# Altium footprint library Screw.PcbLib: 17 footprints (part 1 of 2)
Each footprint in its own frame and in the unit in brackets; x right, y up, seen from the top. Pads: shape width x height; smd on the part's side, far side on the other; paste and mask are expansions set on the pad; w line width, h text height; cw(c..) or ccw(c..) is an arc to the next point about the centre after c.
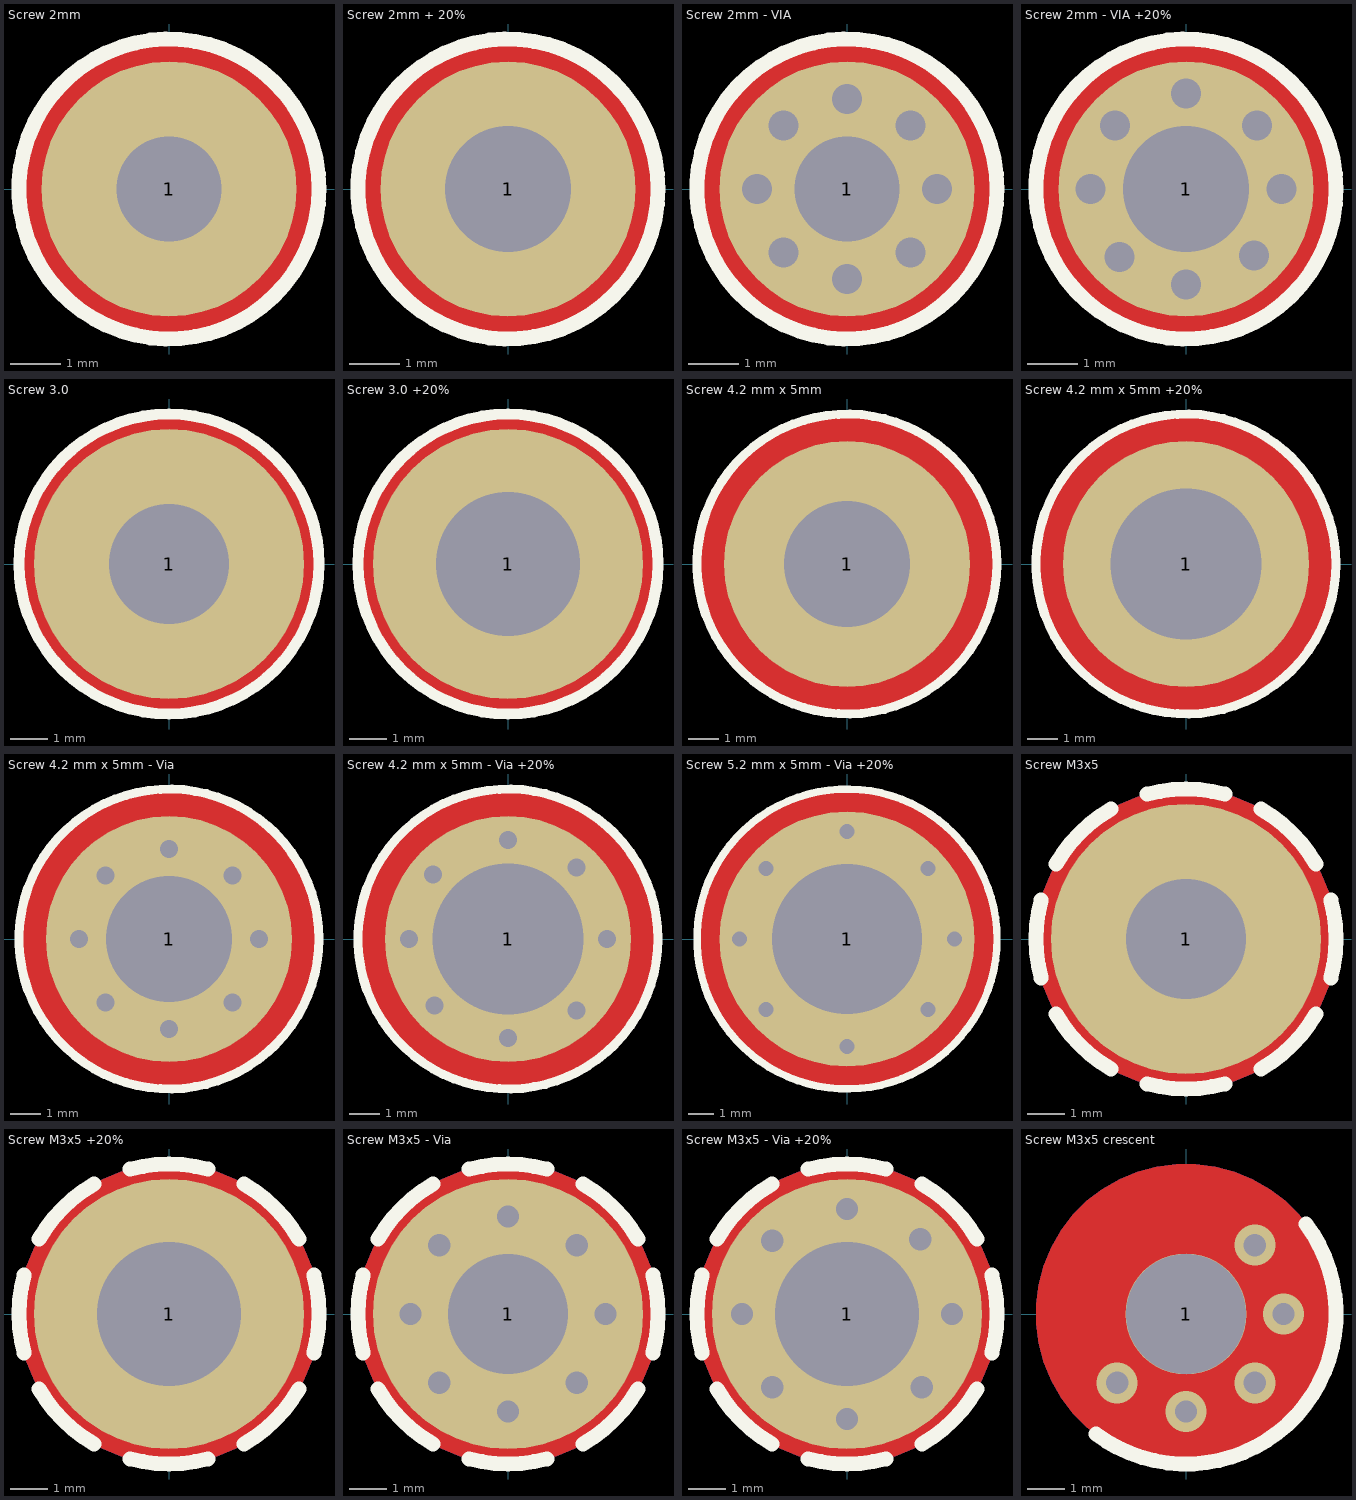
[diagram p0: the footprints below, top view; thin cyan lines are the x and y axes]

## Screw 2mm [mm] "Hole 2.1mm"
height 10
pads (1):
  round 5.1 hole 2.1 mask+0.1: 1(0,0)
Top Layer:
  pour cut-out: 0,-3 -0.197,-3 -0.587,-2.949 -0.966,-2.847 -1.33,-2.696 -1.67,-2.5 -1.982,-2.26 -2.26,-1.982 -2.5,-1.67 -2.696,-1.33 -2.847,-0.966 -2.949,-0.587 -3,-0.197 -3,0 -3,0.197 -2.949,0.587 -2.847,0.966 -2.696,1.33 -2.5,1.67 -2.26,1.982 -1.982,2.26 -1.67,2.5 -1.33,2.696 -0.966,2.847 -0.587,2.949 -0.197,3 0,3 0.197,3 0.587,2.949 0.966,2.847 1.33,2.696 1.67,2.5 1.982,2.26 2.26,1.982 2.5,1.67 2.696,1.33 2.847,0.966 2.949,0.587 3,0.197 3,0 3,-0.197 2.949,-0.587 2.847,-0.966 2.696,-1.33 2.5,-1.67 2.26,-1.982 1.982,-2.26 1.67,-2.5 1.33,-2.696 0.966,-2.847 0.587,-2.949 0.197,-3
Bottom Layer:
  pour cut-out: 0,-3 -0.197,-3 -0.587,-2.949 -0.966,-2.847 -1.33,-2.696 -1.67,-2.5 -1.982,-2.26 -2.26,-1.982 -2.5,-1.67 -2.696,-1.33 -2.847,-0.966 -2.949,-0.587 -3,-0.197 -3,0 -3,0.197 -2.949,0.587 -2.847,0.966 -2.696,1.33 -2.5,1.67 -2.26,1.982 -1.982,2.26 -1.67,2.5 -1.33,2.696 -0.966,2.847 -0.587,2.949 -0.197,3 0,3 0.197,3 0.587,2.949 0.966,2.847 1.33,2.696 1.67,2.5 1.982,2.26 2.26,1.982 2.5,1.67 2.696,1.33 2.847,0.966 2.949,0.587 3,0.197 3,0 3,-0.197 2.949,-0.587 2.847,-0.966 2.696,-1.33 2.5,-1.67 2.26,-1.982 1.982,-2.26 1.67,-2.5 1.33,-2.696 0.966,-2.847 0.587,-2.949 0.197,-3
Top Overlay:
  circle w0.3: c0,0 r3
3D body "pn11340018.stp": height 1.73, standoff -3.8, extent -2,-2 2,2

## Screw 2mm + 20% [mm] "Hole 2.1mm"
height 10
pads (1):
  round 5.1 hole 2.52 mask+0.1: 1(0,0)
Top Layer:
  pour cut-out: 0,-3 -0.197,-3 -0.587,-2.949 -0.966,-2.847 -1.33,-2.696 -1.67,-2.5 -1.982,-2.26 -2.26,-1.982 -2.5,-1.67 -2.696,-1.33 -2.847,-0.966 -2.949,-0.587 -3,-0.197 -3,0 -3,0.197 -2.949,0.587 -2.847,0.966 -2.696,1.33 -2.5,1.67 -2.26,1.982 -1.982,2.26 -1.67,2.5 -1.33,2.696 -0.966,2.847 -0.587,2.949 -0.197,3 0,3 0.197,3 0.587,2.949 0.966,2.847 1.33,2.696 1.67,2.5 1.982,2.26 2.26,1.982 2.5,1.67 2.696,1.33 2.847,0.966 2.949,0.587 3,0.197 3,0 3,-0.197 2.949,-0.587 2.847,-0.966 2.696,-1.33 2.5,-1.67 2.26,-1.982 1.982,-2.26 1.67,-2.5 1.33,-2.696 0.966,-2.847 0.587,-2.949 0.197,-3
Bottom Layer:
  pour cut-out: 0,-3 -0.197,-3 -0.587,-2.949 -0.966,-2.847 -1.33,-2.696 -1.67,-2.5 -1.982,-2.26 -2.26,-1.982 -2.5,-1.67 -2.696,-1.33 -2.847,-0.966 -2.949,-0.587 -3,-0.197 -3,0 -3,0.197 -2.949,0.587 -2.847,0.966 -2.696,1.33 -2.5,1.67 -2.26,1.982 -1.982,2.26 -1.67,2.5 -1.33,2.696 -0.966,2.847 -0.587,2.949 -0.197,3 0,3 0.197,3 0.587,2.949 0.966,2.847 1.33,2.696 1.67,2.5 1.982,2.26 2.26,1.982 2.5,1.67 2.696,1.33 2.847,0.966 2.949,0.587 3,0.197 3,0 3,-0.197 2.949,-0.587 2.847,-0.966 2.696,-1.33 2.5,-1.67 2.26,-1.982 1.982,-2.26 1.67,-2.5 1.33,-2.696 0.966,-2.847 0.587,-2.949 0.197,-3
Top Overlay:
  circle w0.3: c0,0 r3
3D body "pn11340018.stp": height 1.73, standoff -3.8, extent -2,-2 2,2

## Screw 2mm - VIA [mm] "Hole 2.1mm"
height 10
pads (1):
  round 5.1 hole 2.1 mask+0.1: 1(0,0)
via 0,1.8 diameter 1.1 hole 0.6
via -1.273,1.273 diameter 1.1 hole 0.6
via -1.8,0 diameter 1.1 hole 0.6
via -1.273,-1.273 diameter 1.1 hole 0.6
via 0,-1.8 diameter 1.1 hole 0.6
via 1.273,-1.273 diameter 1.1 hole 0.6
via 1.8,0 diameter 1.1 hole 0.6
via 1.273,1.273 diameter 1.1 hole 0.6
Top Layer:
  pour cut-out: 0,-3 -0.197,-3 -0.587,-2.949 -0.966,-2.847 -1.33,-2.696 -1.67,-2.5 -1.982,-2.26 -2.26,-1.982 -2.5,-1.67 -2.696,-1.33 -2.847,-0.966 -2.949,-0.587 -3,-0.197 -3,0 -3,0.197 -2.949,0.587 -2.847,0.966 -2.696,1.33 -2.5,1.67 -2.26,1.982 -1.982,2.26 -1.67,2.5 -1.33,2.696 -0.966,2.847 -0.587,2.949 -0.197,3 0,3 0.197,3 0.587,2.949 0.966,2.847 1.33,2.696 1.67,2.5 1.982,2.26 2.26,1.982 2.5,1.67 2.696,1.33 2.847,0.966 2.949,0.587 3,0.197 3,0 3,-0.197 2.949,-0.587 2.847,-0.966 2.696,-1.33 2.5,-1.67 2.26,-1.982 1.982,-2.26 1.67,-2.5 1.33,-2.696 0.966,-2.847 0.587,-2.949 0.197,-3
Bottom Layer:
  pour cut-out: 0,-3 -0.197,-3 -0.587,-2.949 -0.966,-2.847 -1.33,-2.696 -1.67,-2.5 -1.982,-2.26 -2.26,-1.982 -2.5,-1.67 -2.696,-1.33 -2.847,-0.966 -2.949,-0.587 -3,-0.197 -3,0 -3,0.197 -2.949,0.587 -2.847,0.966 -2.696,1.33 -2.5,1.67 -2.26,1.982 -1.982,2.26 -1.67,2.5 -1.33,2.696 -0.966,2.847 -0.587,2.949 -0.197,3 0,3 0.197,3 0.587,2.949 0.966,2.847 1.33,2.696 1.67,2.5 1.982,2.26 2.26,1.982 2.5,1.67 2.696,1.33 2.847,0.966 2.949,0.587 3,0.197 3,0 3,-0.197 2.949,-0.587 2.847,-0.966 2.696,-1.33 2.5,-1.67 2.26,-1.982 1.982,-2.26 1.67,-2.5 1.33,-2.696 0.966,-2.847 0.587,-2.949 0.197,-3
Top Overlay:
  circle w0.3: c0,0 r3
3D body "pn11340018.stp": height 1.73, standoff -3.8, extent -2,-2 2,2

## Screw 2mm - VIA +20% [mm] "Hole 2.1mm"
height 10
pads (1):
  round 5.1 hole 2.52 mask+0.1: 1(0,0)
via -1.33,-1.364 diameter 1.1 hole 0.6
via -1.905,0 diameter 1.1 hole 0.6
via -1.417,1.273 diameter 1.1 hole 0.6
via 0,1.905 diameter 1.1 hole 0.6
via 1.417,1.273 diameter 1.1 hole 0.6
via 1.905,0 diameter 1.1 hole 0.6
via 1.364,-1.33 diameter 1.1 hole 0.6
via 0,-1.905 diameter 1.1 hole 0.6
Top Layer:
  pour cut-out: 0,-3 -0.197,-3 -0.587,-2.949 -0.966,-2.847 -1.33,-2.696 -1.67,-2.5 -1.982,-2.26 -2.26,-1.982 -2.5,-1.67 -2.696,-1.33 -2.847,-0.966 -2.949,-0.587 -3,-0.197 -3,0 -3,0.197 -2.949,0.587 -2.847,0.966 -2.696,1.33 -2.5,1.67 -2.26,1.982 -1.982,2.26 -1.67,2.5 -1.33,2.696 -0.966,2.847 -0.587,2.949 -0.197,3 0,3 0.197,3 0.587,2.949 0.966,2.847 1.33,2.696 1.67,2.5 1.982,2.26 2.26,1.982 2.5,1.67 2.696,1.33 2.847,0.966 2.949,0.587 3,0.197 3,0 3,-0.197 2.949,-0.587 2.847,-0.966 2.696,-1.33 2.5,-1.67 2.26,-1.982 1.982,-2.26 1.67,-2.5 1.33,-2.696 0.966,-2.847 0.587,-2.949 0.197,-3
Bottom Layer:
  pour cut-out: 0,-3 -0.197,-3 -0.587,-2.949 -0.966,-2.847 -1.33,-2.696 -1.67,-2.5 -1.982,-2.26 -2.26,-1.982 -2.5,-1.67 -2.696,-1.33 -2.847,-0.966 -2.949,-0.587 -3,-0.197 -3,0 -3,0.197 -2.949,0.587 -2.847,0.966 -2.696,1.33 -2.5,1.67 -2.26,1.982 -1.982,2.26 -1.67,2.5 -1.33,2.696 -0.966,2.847 -0.587,2.949 -0.197,3 0,3 0.197,3 0.587,2.949 0.966,2.847 1.33,2.696 1.67,2.5 1.982,2.26 2.26,1.982 2.5,1.67 2.696,1.33 2.847,0.966 2.949,0.587 3,0.197 3,0 3,-0.197 2.949,-0.587 2.847,-0.966 2.696,-1.33 2.5,-1.67 2.26,-1.982 1.982,-2.26 1.67,-2.5 1.33,-2.696 0.966,-2.847 0.587,-2.949 0.197,-3
Top Overlay:
  circle w0.3: c0,0 r3
3D body "pn11340018.stp": height 1.73, standoff -3.8, extent -2,-2 2,2

## Screw 3.0 [mm] "Hole 3.0mm"
height 10
pads (1):
  round 7.2 hole 3.2 mask+0.1: 1(0,0)
Top Layer:
  pour cut-out: 0,-4 -0.262,-4 -0.782,-3.932 -1.289,-3.796 -1.773,-3.595 -2.227,-3.333 -2.643,-3.014 -3.014,-2.643 -3.333,-2.227 -3.595,-1.773 -3.796,-1.289 -3.932,-0.782 -4,-0.262 -4,0 -4,0.262 -3.932,0.782 -3.796,1.289 -3.595,1.773 -3.333,2.227 -3.014,2.643 -2.643,3.014 -2.227,3.333 -1.773,3.595 -1.289,3.796 -0.782,3.932 -0.262,4 0,4 0.262,4 0.782,3.932 1.289,3.796 1.773,3.595 2.227,3.333 2.643,3.014 3.014,2.643 3.333,2.227 3.595,1.773 3.796,1.289 3.932,0.782 4,0.262 4,0 4,-0.262 3.932,-0.782 3.796,-1.289 3.595,-1.773 3.333,-2.227 3.014,-2.643 2.643,-3.014 2.227,-3.333 1.773,-3.595 1.289,-3.796 0.782,-3.932 0.262,-4
Bottom Layer:
  pour cut-out: 0,-4 -0.262,-4 -0.782,-3.932 -1.289,-3.796 -1.773,-3.595 -2.227,-3.333 -2.643,-3.014 -3.014,-2.643 -3.333,-2.227 -3.595,-1.773 -3.796,-1.289 -3.932,-0.782 -4,-0.262 -4,0 -4,0.262 -3.932,0.782 -3.796,1.289 -3.595,1.773 -3.333,2.227 -3.014,2.643 -2.643,3.014 -2.227,3.333 -1.773,3.595 -1.289,3.796 -0.782,3.932 -0.262,4 0,4 0.262,4 0.782,3.932 1.289,3.796 1.773,3.595 2.227,3.333 2.643,3.014 3.014,2.643 3.333,2.227 3.595,1.773 3.796,1.289 3.932,0.782 4,0.262 4,0 4,-0.262 3.932,-0.782 3.796,-1.289 3.595,-1.773 3.333,-2.227 3.014,-2.643 2.643,-3.014 2.227,-3.333 1.773,-3.595 1.289,-3.796 0.782,-3.932 0.262,-4
Top Overlay:
  circle w0.3: c0,0 r4
3D body "Screw-3mmX10mm.step": height 1.73, standoff -10, extent -2.5,-2.5 2.5,2.5

## Screw 3.0 +20% [mm] "Hole 3.0mm"
height 10
pads (1):
  round 7.2 hole 3.84 mask+0.1: 1(0,0)
Top Layer:
  pour cut-out: 0,-4 -0.262,-4 -0.782,-3.932 -1.289,-3.796 -1.773,-3.595 -2.227,-3.333 -2.643,-3.014 -3.014,-2.643 -3.333,-2.227 -3.595,-1.773 -3.796,-1.289 -3.932,-0.782 -4,-0.262 -4,0 -4,0.262 -3.932,0.782 -3.796,1.289 -3.595,1.773 -3.333,2.227 -3.014,2.643 -2.643,3.014 -2.227,3.333 -1.773,3.595 -1.289,3.796 -0.782,3.932 -0.262,4 0,4 0.262,4 0.782,3.932 1.289,3.796 1.773,3.595 2.227,3.333 2.643,3.014 3.014,2.643 3.333,2.227 3.595,1.773 3.796,1.289 3.932,0.782 4,0.262 4,0 4,-0.262 3.932,-0.782 3.796,-1.289 3.595,-1.773 3.333,-2.227 3.014,-2.643 2.643,-3.014 2.227,-3.333 1.773,-3.595 1.289,-3.796 0.782,-3.932 0.262,-4
Bottom Layer:
  pour cut-out: 0,-4 -0.262,-4 -0.782,-3.932 -1.289,-3.796 -1.773,-3.595 -2.227,-3.333 -2.643,-3.014 -3.014,-2.643 -3.333,-2.227 -3.595,-1.773 -3.796,-1.289 -3.932,-0.782 -4,-0.262 -4,0 -4,0.262 -3.932,0.782 -3.796,1.289 -3.595,1.773 -3.333,2.227 -3.014,2.643 -2.643,3.014 -2.227,3.333 -1.773,3.595 -1.289,3.796 -0.782,3.932 -0.262,4 0,4 0.262,4 0.782,3.932 1.289,3.796 1.773,3.595 2.227,3.333 2.643,3.014 3.014,2.643 3.333,2.227 3.595,1.773 3.796,1.289 3.932,0.782 4,0.262 4,0 4,-0.262 3.932,-0.782 3.796,-1.289 3.595,-1.773 3.333,-2.227 3.014,-2.643 2.643,-3.014 2.227,-3.333 1.773,-3.595 1.289,-3.796 0.782,-3.932 0.262,-4
Top Overlay:
  circle w0.3: c0,0 r4
3D body "Screw-3mmX10mm.step": height 1.73, standoff -10, extent -2.5,-2.5 2.5,2.5

## Screw 4.2 mm x 5mm [mm] "Hole 4.2 mm"
height 10
pads (1):
  round 8.2 hole 4.2 mask+0.1: 1(0,0)
Top Layer:
  pour cut-out: 0,-5 -0.328,-5 -0.978,-4.914 -1.611,-4.745 -2.216,-4.494 -2.784,-4.166 -3.304,-3.767 -3.767,-3.304 -4.166,-2.784 -4.494,-2.216 -4.745,-1.611 -4.914,-0.978 -5,-0.328 -5,0 -5,0.328 -4.914,0.978 -4.745,1.611 -4.494,2.216 -4.166,2.784 -3.767,3.304 -3.304,3.767 -2.784,4.166 -2.216,4.494 -1.611,4.745 -0.978,4.914 -0.328,5 0,5 0.328,5 0.978,4.914 1.611,4.745 2.216,4.494 2.784,4.166 3.304,3.767 3.767,3.304 4.166,2.784 4.494,2.216 4.745,1.611 4.914,0.978 5,0.328 5,0 5,-0.328 4.914,-0.978 4.745,-1.611 4.494,-2.216 4.166,-2.784 3.767,-3.304 3.304,-3.767 2.784,-4.166 2.216,-4.494 1.611,-4.745 0.978,-4.914 0.328,-5
Bottom Layer:
  pour cut-out: 0,-5 -0.328,-5 -0.978,-4.914 -1.611,-4.745 -2.216,-4.494 -2.784,-4.166 -3.304,-3.767 -3.767,-3.304 -4.166,-2.784 -4.494,-2.216 -4.745,-1.611 -4.914,-0.978 -5,-0.328 -5,0 -5,0.328 -4.914,0.978 -4.745,1.611 -4.494,2.216 -4.166,2.784 -3.767,3.304 -3.304,3.767 -2.784,4.166 -2.216,4.494 -1.611,4.745 -0.978,4.914 -0.328,5 0,5 0.328,5 0.978,4.914 1.611,4.745 2.216,4.494 2.784,4.166 3.304,3.767 3.767,3.304 4.166,2.784 4.494,2.216 4.745,1.611 4.914,0.978 5,0.328 5,0 5,-0.328 4.914,-0.978 4.745,-1.611 4.494,-2.216 4.166,-2.784 3.767,-3.304 3.304,-3.767 2.784,-4.166 2.216,-4.494 1.611,-4.745 0.978,-4.914 0.328,-5
Top Overlay:
  circle w0.3: c0,0 r5
3D body "t1crfchms_unf_no__8_36_0_188_0_188.stp": height 2.2, standoff -2.58, extent -3.619,-3.619 3.62,3.62

## Screw 4.2 mm x 5mm +20% [mm] "Hole 4.2 mm"
height 10
pads (1):
  round 8.2 hole 5.04 mask+0.1: 1(0,0)
Top Layer:
  pour cut-out: 0,-5 -0.328,-5 -0.978,-4.914 -1.611,-4.745 -2.216,-4.494 -2.784,-4.166 -3.304,-3.767 -3.767,-3.304 -4.166,-2.784 -4.494,-2.216 -4.745,-1.611 -4.914,-0.978 -5,-0.328 -5,0 -5,0.328 -4.914,0.978 -4.745,1.611 -4.494,2.216 -4.166,2.784 -3.767,3.304 -3.304,3.767 -2.784,4.166 -2.216,4.494 -1.611,4.745 -0.978,4.914 -0.328,5 0,5 0.328,5 0.978,4.914 1.611,4.745 2.216,4.494 2.784,4.166 3.304,3.767 3.767,3.304 4.166,2.784 4.494,2.216 4.745,1.611 4.914,0.978 5,0.328 5,0 5,-0.328 4.914,-0.978 4.745,-1.611 4.494,-2.216 4.166,-2.784 3.767,-3.304 3.304,-3.767 2.784,-4.166 2.216,-4.494 1.611,-4.745 0.978,-4.914 0.328,-5
Bottom Layer:
  pour cut-out: 0,-5 -0.328,-5 -0.978,-4.914 -1.611,-4.745 -2.216,-4.494 -2.784,-4.166 -3.304,-3.767 -3.767,-3.304 -4.166,-2.784 -4.494,-2.216 -4.745,-1.611 -4.914,-0.978 -5,-0.328 -5,0 -5,0.328 -4.914,0.978 -4.745,1.611 -4.494,2.216 -4.166,2.784 -3.767,3.304 -3.304,3.767 -2.784,4.166 -2.216,4.494 -1.611,4.745 -0.978,4.914 -0.328,5 0,5 0.328,5 0.978,4.914 1.611,4.745 2.216,4.494 2.784,4.166 3.304,3.767 3.767,3.304 4.166,2.784 4.494,2.216 4.745,1.611 4.914,0.978 5,0.328 5,0 5,-0.328 4.914,-0.978 4.745,-1.611 4.494,-2.216 4.166,-2.784 3.767,-3.304 3.304,-3.767 2.784,-4.166 2.216,-4.494 1.611,-4.745 0.978,-4.914 0.328,-5
Top Overlay:
  circle w0.3: c0,0 r5
3D body "t1crfchms_unf_no__8_36_0_188_0_188.stp": height 2.2, standoff -2.58, extent -3.619,-3.619 3.62,3.62

## Screw 4.2 mm x 5mm - Via [mm] "Hole 4.2 mm"
height 10
pads (1):
  round 8.2 hole 4.2 mask+0.1: 1(0,0)
via 0,3 diameter 1.1 hole 0.6
via -2.121,2.121 diameter 1.1 hole 0.6
via -3,0 diameter 1.1 hole 0.6
via -2.121,-2.121 diameter 1.1 hole 0.6
via 0,-3 diameter 1.1 hole 0.6
via 2.121,-2.121 diameter 1.1 hole 0.6
via 3,0 diameter 1.1 hole 0.6
via 2.121,2.121 diameter 1.1 hole 0.6
Top Layer:
  pour cut-out: 0,-5 -0.328,-5 -0.978,-4.914 -1.611,-4.745 -2.216,-4.494 -2.784,-4.166 -3.304,-3.767 -3.767,-3.304 -4.166,-2.784 -4.494,-2.216 -4.745,-1.611 -4.914,-0.978 -5,-0.328 -5,0 -5,0.328 -4.914,0.978 -4.745,1.611 -4.494,2.216 -4.166,2.784 -3.767,3.304 -3.304,3.767 -2.784,4.166 -2.216,4.494 -1.611,4.745 -0.978,4.914 -0.328,5 0,5 0.328,5 0.978,4.914 1.611,4.745 2.216,4.494 2.784,4.166 3.304,3.767 3.767,3.304 4.166,2.784 4.494,2.216 4.745,1.611 4.914,0.978 5,0.328 5,0 5,-0.328 4.914,-0.978 4.745,-1.611 4.494,-2.216 4.166,-2.784 3.767,-3.304 3.304,-3.767 2.784,-4.166 2.216,-4.494 1.611,-4.745 0.978,-4.914 0.328,-5
Bottom Layer:
  pour cut-out: 0,-5 -0.328,-5 -0.978,-4.914 -1.611,-4.745 -2.216,-4.494 -2.784,-4.166 -3.304,-3.767 -3.767,-3.304 -4.166,-2.784 -4.494,-2.216 -4.745,-1.611 -4.914,-0.978 -5,-0.328 -5,0 -5,0.328 -4.914,0.978 -4.745,1.611 -4.494,2.216 -4.166,2.784 -3.767,3.304 -3.304,3.767 -2.784,4.166 -2.216,4.494 -1.611,4.745 -0.978,4.914 -0.328,5 0,5 0.328,5 0.978,4.914 1.611,4.745 2.216,4.494 2.784,4.166 3.304,3.767 3.767,3.304 4.166,2.784 4.494,2.216 4.745,1.611 4.914,0.978 5,0.328 5,0 5,-0.328 4.914,-0.978 4.745,-1.611 4.494,-2.216 4.166,-2.784 3.767,-3.304 3.304,-3.767 2.784,-4.166 2.216,-4.494 1.611,-4.745 0.978,-4.914 0.328,-5
Top Overlay:
  circle w0.3: c0,0 r5
3D body "t1crfchms_unf_no__8_36_0_188_0_188.stp": height 2.2, standoff -2.58, extent -3.619,-3.619 3.62,3.62

## Screw 4.2 mm x 5mm - Via +20% [mm] "Hole 4.2 mm"
height 10
pads (1):
  round 8.2 hole 5.04 mask+0.1: 1(0,0)
via -2.448,-2.216 diameter 1.1 hole 0.6
via -3.302,0 diameter 1.1 hole 0.6
via -2.5,2.157 diameter 1.1 hole 0.6
via 0,3.302 diameter 1.1 hole 0.6
via 2.286,2.383 diameter 1.1 hole 0.6
via 3.302,0 diameter 1.1 hole 0.6
via 2.286,-2.383 diameter 1.1 hole 0.6
via 0,-3.302 diameter 1.1 hole 0.6
Top Layer:
  pour cut-out: 0,-5 -0.328,-5 -0.978,-4.914 -1.611,-4.745 -2.216,-4.494 -2.784,-4.166 -3.304,-3.767 -3.767,-3.304 -4.166,-2.784 -4.494,-2.216 -4.745,-1.611 -4.914,-0.978 -5,-0.328 -5,0 -5,0.328 -4.914,0.978 -4.745,1.611 -4.494,2.216 -4.166,2.784 -3.767,3.304 -3.304,3.767 -2.784,4.166 -2.216,4.494 -1.611,4.745 -0.978,4.914 -0.328,5 0,5 0.328,5 0.978,4.914 1.611,4.745 2.216,4.494 2.784,4.166 3.304,3.767 3.767,3.304 4.166,2.784 4.494,2.216 4.745,1.611 4.914,0.978 5,0.328 5,0 5,-0.328 4.914,-0.978 4.745,-1.611 4.494,-2.216 4.166,-2.784 3.767,-3.304 3.304,-3.767 2.784,-4.166 2.216,-4.494 1.611,-4.745 0.978,-4.914 0.328,-5
Bottom Layer:
  pour cut-out: 0,-5 -0.328,-5 -0.978,-4.914 -1.611,-4.745 -2.216,-4.494 -2.784,-4.166 -3.304,-3.767 -3.767,-3.304 -4.166,-2.784 -4.494,-2.216 -4.745,-1.611 -4.914,-0.978 -5,-0.328 -5,0 -5,0.328 -4.914,0.978 -4.745,1.611 -4.494,2.216 -4.166,2.784 -3.767,3.304 -3.304,3.767 -2.784,4.166 -2.216,4.494 -1.611,4.745 -0.978,4.914 -0.328,5 0,5 0.328,5 0.978,4.914 1.611,4.745 2.216,4.494 2.784,4.166 3.304,3.767 3.767,3.304 4.166,2.784 4.494,2.216 4.745,1.611 4.914,0.978 5,0.328 5,0 5,-0.328 4.914,-0.978 4.745,-1.611 4.494,-2.216 4.166,-2.784 3.767,-3.304 3.304,-3.767 2.784,-4.166 2.216,-4.494 1.611,-4.745 0.978,-4.914 0.328,-5
Top Overlay:
  circle w0.3: c0,0 r5
3D body "t1crfchms_unf_no__8_36_0_188_0_188.stp": height 2.2, standoff -2.58, extent -3.619,-3.619 3.62,3.62

## Screw 5.2 mm x 5mm - Via +20% [mm] "Hole 4.2 mm"
height 10
pads (1):
  round 10.2 hole 6 mask+0.1: 1(0,0)
via 3.242,2.828 diameter 1.1 hole 0.6
via -3.242,-2.828 diameter 1.1 hole 0.6
via -4.302,0 diameter 1.1 hole 0.6
via -3.242,2.828 diameter 1.1 hole 0.6
via 0,4.302 diameter 1.1 hole 0.6
via 4.302,0 diameter 1.1 hole 0.6
via 3.242,-2.828 diameter 1.1 hole 0.6
via 0,-4.302 diameter 1.1 hole 0.6
Top Layer:
  pour cut-out: 0,-6 -0.295,-6 -0.881,-5.942 -1.46,-5.827 -2.024,-5.656 -2.568,-5.43 -3.088,-5.153 -3.579,-4.825 -4.034,-4.451 -4.451,-4.034 -4.825,-3.579 -5.153,-3.088 -5.43,-2.568 -5.656,-2.024 -5.827,-1.46 -5.942,-0.881 -6,-0.295 -6,0 -6,0.295 -5.942,0.881 -5.827,1.46 -5.656,2.024 -5.43,2.568 -5.153,3.088 -4.825,3.579 -4.451,4.034 -4.034,4.451 -3.579,4.825 -3.088,5.153 -2.568,5.43 -2.024,5.656 -1.46,5.827 -0.881,5.942 -0.295,6 0,6 0.295,6 0.881,5.942 1.46,5.827 2.024,5.656 2.568,5.43 3.088,5.153 3.579,4.825 4.034,4.451 4.451,4.034 4.825,3.579 5.153,3.088 5.43,2.568 5.656,2.024 5.827,1.46 5.942,0.881 6,0.295 6,0 6,-0.295 5.942,-0.881 5.827,-1.46 5.656,-2.024 5.43,-2.568 5.153,-3.088 4.825,-3.579 4.451,-4.034 4.034,-4.451 3.579,-4.825 3.088,-5.153 2.568,-5.43 2.024,-5.656 1.46,-5.827 0.881,-5.942 0.295,-6
Bottom Layer:
  pour cut-out: 0,-6 0.295,-6 0.881,-5.942 1.46,-5.827 2.024,-5.656 2.568,-5.43 3.088,-5.153 3.579,-4.825 4.034,-4.451 4.451,-4.034 4.825,-3.579 5.153,-3.088 5.43,-2.568 5.656,-2.024 5.827,-1.46 5.942,-0.881 6,-0.295 6,0 6,0.295 5.942,0.881 5.827,1.46 5.656,2.024 5.43,2.568 5.153,3.088 4.825,3.579 4.451,4.034 4.034,4.451 3.579,4.825 3.088,5.153 2.568,5.43 2.024,5.656 1.46,5.827 0.881,5.942 0.295,6 0,6 -0.295,6 -0.881,5.942 -1.46,5.827 -2.024,5.656 -2.568,5.43 -3.088,5.153 -3.579,4.825 -4.034,4.451 -4.451,4.034 -4.825,3.579 -5.153,3.088 -5.43,2.568 -5.656,2.024 -5.827,1.46 -5.942,0.881 -6,0.295 -6,0 -6,-0.295 -5.942,-0.881 -5.827,-1.46 -5.656,-2.024 -5.43,-2.568 -5.153,-3.088 -4.825,-3.579 -4.451,-4.034 -4.034,-4.451 -3.579,-4.825 -3.088,-5.153 -2.568,-5.43 -2.024,-5.656 -1.46,-5.827 -0.881,-5.942 -0.295,-6
Top Overlay:
  circle w0.3: c0,0 r6
3D body "t1crfchms_unf_no__8_36_0_188_0_188.stp": height 2.2, standoff -2.58, extent -3.619,-3.619 3.62,3.62

## Screw M3x5 [mm] "Hole 3.0mm"
height 10
pads (1):
  round 7.2 hole 3.2 mask+0.1: 1(0,0)
Top Layer:
  pour cut-out: 0,-4 -0.262,-4 -0.782,-3.932 -1.289,-3.796 -1.773,-3.595 -2.227,-3.333 -2.643,-3.014 -3.014,-2.643 -3.333,-2.227 -3.595,-1.773 -3.796,-1.289 -3.932,-0.782 -4,-0.262 -4,0 -4,0.262 -3.932,0.782 -3.796,1.289 -3.595,1.773 -3.333,2.227 -3.014,2.643 -2.643,3.014 -2.227,3.333 -1.773,3.595 -1.289,3.796 -0.782,3.932 -0.262,4 0,4 0.262,4 0.782,3.932 1.289,3.796 1.773,3.595 2.227,3.333 2.643,3.014 3.014,2.643 3.333,2.227 3.595,1.773 3.796,1.289 3.932,0.782 4,0.262 4,0 4,-0.262 3.932,-0.782 3.796,-1.289 3.595,-1.773 3.333,-2.227 3.014,-2.643 2.643,-3.014 2.227,-3.333 1.773,-3.595 1.289,-3.796 0.782,-3.932 0.262,-4
Bottom Layer:
  pour cut-out: 0,-4 -0.262,-4 -0.782,-3.932 -1.289,-3.796 -1.773,-3.595 -2.227,-3.333 -2.643,-3.014 -3.014,-2.643 -3.333,-2.227 -3.595,-1.773 -3.796,-1.289 -3.932,-0.782 -4,-0.262 -4,0 -4,0.262 -3.932,0.782 -3.796,1.289 -3.595,1.773 -3.333,2.227 -3.014,2.643 -2.643,3.014 -2.227,3.333 -1.773,3.595 -1.289,3.796 -0.782,3.932 -0.262,4 0,4 0.262,4 0.782,3.932 1.289,3.796 1.773,3.595 2.227,3.333 2.643,3.014 3.014,2.643 3.333,2.227 3.595,1.773 3.796,1.289 3.932,0.782 4,0.262 4,0 4,-0.262 3.932,-0.782 3.796,-1.289 3.595,-1.773 3.333,-2.227 3.014,-2.643 2.643,-3.014 2.227,-3.333 1.773,-3.595 1.289,-3.796 0.782,-3.932 0.262,-4
Top Overlay:
  lines w0.4: -3.864,-1.035 cw(c0,0) -3.864,1.035 ; -3.464,-2 ccw(c0,0) -2,-3.464 ; -3.464,2 cw(c0,0) -2,3.464 ; -1.035,-3.864 ccw(c0,0) 1.035,-3.864 ; -1.035,3.864 cw(c0,0) 1.035,3.864 ; 2,-3.464 ccw(c0,0) 3.464,-2 ; 2,3.464 cw(c0,0) 3.464,2 ; 3.864,-1.035 ccw(c0,0) 3.864,1.035
3D body "SCRW_CHSH_PHLIPS_M3X5.stp": height 2.53, standoff -4.8, extent -3,-3 3,3

## Screw M3x5 +20% [mm] "Hole 3.0mm"
height 10
pads (1):
  round 7.2 hole 3.84 mask+0.1: 1(0,0)
Top Layer:
  pour cut-out: 0,-4 -0.262,-4 -0.782,-3.932 -1.289,-3.796 -1.773,-3.595 -2.227,-3.333 -2.643,-3.014 -3.014,-2.643 -3.333,-2.227 -3.595,-1.773 -3.796,-1.289 -3.932,-0.782 -4,-0.262 -4,0 -4,0.262 -3.932,0.782 -3.796,1.289 -3.595,1.773 -3.333,2.227 -3.014,2.643 -2.643,3.014 -2.227,3.333 -1.773,3.595 -1.289,3.796 -0.782,3.932 -0.262,4 0,4 0.262,4 0.782,3.932 1.289,3.796 1.773,3.595 2.227,3.333 2.643,3.014 3.014,2.643 3.333,2.227 3.595,1.773 3.796,1.289 3.932,0.782 4,0.262 4,0 4,-0.262 3.932,-0.782 3.796,-1.289 3.595,-1.773 3.333,-2.227 3.014,-2.643 2.643,-3.014 2.227,-3.333 1.773,-3.595 1.289,-3.796 0.782,-3.932 0.262,-4
Bottom Layer:
  pour cut-out: 0,-4 -0.262,-4 -0.782,-3.932 -1.289,-3.796 -1.773,-3.595 -2.227,-3.333 -2.643,-3.014 -3.014,-2.643 -3.333,-2.227 -3.595,-1.773 -3.796,-1.289 -3.932,-0.782 -4,-0.262 -4,0 -4,0.262 -3.932,0.782 -3.796,1.289 -3.595,1.773 -3.333,2.227 -3.014,2.643 -2.643,3.014 -2.227,3.333 -1.773,3.595 -1.289,3.796 -0.782,3.932 -0.262,4 0,4 0.262,4 0.782,3.932 1.289,3.796 1.773,3.595 2.227,3.333 2.643,3.014 3.014,2.643 3.333,2.227 3.595,1.773 3.796,1.289 3.932,0.782 4,0.262 4,0 4,-0.262 3.932,-0.782 3.796,-1.289 3.595,-1.773 3.333,-2.227 3.014,-2.643 2.643,-3.014 2.227,-3.333 1.773,-3.595 1.289,-3.796 0.782,-3.932 0.262,-4
Top Overlay:
  lines w0.4: -3.864,-1.035 cw(c0,0) -3.864,1.035 ; -3.464,-2 ccw(c0,0) -2,-3.464 ; -3.464,2 cw(c0,0) -2,3.464 ; -1.035,-3.864 ccw(c0,0) 1.035,-3.864 ; -1.035,3.864 cw(c0,0) 1.035,3.864 ; 2,-3.464 ccw(c0,0) 3.464,-2 ; 2,3.464 cw(c0,0) 3.464,2 ; 3.864,-1.035 ccw(c0,0) 3.864,1.035
3D body "SCRW_CHSH_PHLIPS_M3X5.stp": height 2.53, standoff -4.8, extent -3,-3 3,3

## Screw M3x5 - Via [mm] "Hole 3.0mm"
height 10
pads (1):
  round 7.2 hole 3.2 mask+0.1: 1(0,0)
via 1.838,1.838 diameter 1.1 hole 0.6
via 1.838,-1.838 diameter 1.1 hole 0.6
via -1.838,-1.838 diameter 1.1 hole 0.6
via -1.838,1.838 diameter 1.1 hole 0.6
via 2.6,0 diameter 1.1 hole 0.6
via 0,-2.6 diameter 1.1 hole 0.6
via -2.6,0 diameter 1.1 hole 0.6
via 0,2.6 diameter 1.1 hole 0.6
Top Layer:
  pour cut-out: 0,-4 -0.262,-4 -0.782,-3.932 -1.289,-3.796 -1.773,-3.595 -2.227,-3.333 -2.643,-3.014 -3.014,-2.643 -3.333,-2.227 -3.595,-1.773 -3.796,-1.289 -3.932,-0.782 -4,-0.262 -4,0 -4,0.262 -3.932,0.782 -3.796,1.289 -3.595,1.773 -3.333,2.227 -3.014,2.643 -2.643,3.014 -2.227,3.333 -1.773,3.595 -1.289,3.796 -0.782,3.932 -0.262,4 0,4 0.262,4 0.782,3.932 1.289,3.796 1.773,3.595 2.227,3.333 2.643,3.014 3.014,2.643 3.333,2.227 3.595,1.773 3.796,1.289 3.932,0.782 4,0.262 4,0 4,-0.262 3.932,-0.782 3.796,-1.289 3.595,-1.773 3.333,-2.227 3.014,-2.643 2.643,-3.014 2.227,-3.333 1.773,-3.595 1.289,-3.796 0.782,-3.932 0.262,-4
Bottom Layer:
  pour cut-out: 0,-4 -0.262,-4 -0.782,-3.932 -1.289,-3.796 -1.773,-3.595 -2.227,-3.333 -2.643,-3.014 -3.014,-2.643 -3.333,-2.227 -3.595,-1.773 -3.796,-1.289 -3.932,-0.782 -4,-0.262 -4,0 -4,0.262 -3.932,0.782 -3.796,1.289 -3.595,1.773 -3.333,2.227 -3.014,2.643 -2.643,3.014 -2.227,3.333 -1.773,3.595 -1.289,3.796 -0.782,3.932 -0.262,4 0,4 0.262,4 0.782,3.932 1.289,3.796 1.773,3.595 2.227,3.333 2.643,3.014 3.014,2.643 3.333,2.227 3.595,1.773 3.796,1.289 3.932,0.782 4,0.262 4,0 4,-0.262 3.932,-0.782 3.796,-1.289 3.595,-1.773 3.333,-2.227 3.014,-2.643 2.643,-3.014 2.227,-3.333 1.773,-3.595 1.289,-3.796 0.782,-3.932 0.262,-4
Top Overlay:
  lines w0.4: -3.864,-1.035 cw(c0,0) -3.864,1.035 ; -3.464,-2 ccw(c0,0) -2,-3.464 ; -3.464,2 cw(c0,0) -2,3.464 ; -1.035,-3.864 ccw(c0,0) 1.035,-3.864 ; -1.035,3.864 cw(c0,0) 1.035,3.864 ; 2,-3.464 ccw(c0,0) 3.464,-2 ; 2,3.464 cw(c0,0) 3.464,2 ; 3.864,-1.035 ccw(c0,0) 3.864,1.035
Mechanical 1:
  circle w0.254: c0,0 r2.6
3D body "SCRW_CHSH_PHLIPS_M3X5.stp": height 2.53, standoff -4.8, extent -3,-3 3,3

## Screw M3x5 - Via +20% [mm] "Hole 3.0mm"
height 10
pads (1):
  round 7.2 hole 3.84 mask+0.1: 1(0,0)
via -2,-1.96 diameter 1.1 hole 0.6
via -2.8,0 diameter 1.1 hole 0.6
via -2,1.96 diameter 1.1 hole 0.6
via 0,2.8 diameter 1.1 hole 0.6
via 1.96,2 diameter 1.1 hole 0.6
via 2.8,0 diameter 1.1 hole 0.6
via 2,-1.96 diameter 1.1 hole 0.6
via 0,-2.8 diameter 1.1 hole 0.6
Top Layer:
  pour cut-out: 0,-4 -0.262,-4 -0.782,-3.932 -1.289,-3.796 -1.773,-3.595 -2.227,-3.333 -2.643,-3.014 -3.014,-2.643 -3.333,-2.227 -3.595,-1.773 -3.796,-1.289 -3.932,-0.782 -4,-0.262 -4,0 -4,0.262 -3.932,0.782 -3.796,1.289 -3.595,1.773 -3.333,2.227 -3.014,2.643 -2.643,3.014 -2.227,3.333 -1.773,3.595 -1.289,3.796 -0.782,3.932 -0.262,4 0,4 0.262,4 0.782,3.932 1.289,3.796 1.773,3.595 2.227,3.333 2.643,3.014 3.014,2.643 3.333,2.227 3.595,1.773 3.796,1.289 3.932,0.782 4,0.262 4,0 4,-0.262 3.932,-0.782 3.796,-1.289 3.595,-1.773 3.333,-2.227 3.014,-2.643 2.643,-3.014 2.227,-3.333 1.773,-3.595 1.289,-3.796 0.782,-3.932 0.262,-4
Bottom Layer:
  pour cut-out: 0,-4 -0.262,-4 -0.782,-3.932 -1.289,-3.796 -1.773,-3.595 -2.227,-3.333 -2.643,-3.014 -3.014,-2.643 -3.333,-2.227 -3.595,-1.773 -3.796,-1.289 -3.932,-0.782 -4,-0.262 -4,0 -4,0.262 -3.932,0.782 -3.796,1.289 -3.595,1.773 -3.333,2.227 -3.014,2.643 -2.643,3.014 -2.227,3.333 -1.773,3.595 -1.289,3.796 -0.782,3.932 -0.262,4 0,4 0.262,4 0.782,3.932 1.289,3.796 1.773,3.595 2.227,3.333 2.643,3.014 3.014,2.643 3.333,2.227 3.595,1.773 3.796,1.289 3.932,0.782 4,0.262 4,0 4,-0.262 3.932,-0.782 3.796,-1.289 3.595,-1.773 3.333,-2.227 3.014,-2.643 2.643,-3.014 2.227,-3.333 1.773,-3.595 1.289,-3.796 0.782,-3.932 0.262,-4
Top Overlay:
  lines w0.4: -3.864,-1.035 cw(c0,0) -3.864,1.035 ; -3.464,-2 ccw(c0,0) -2,-3.464 ; -3.464,2 cw(c0,0) -2,3.464 ; -1.035,-3.864 ccw(c0,0) 1.035,-3.864 ; -1.035,3.864 cw(c0,0) 1.035,3.864 ; 2,-3.464 ccw(c0,0) 3.464,-2 ; 2,3.464 cw(c0,0) 3.464,2 ; 3.864,-1.035 ccw(c0,0) 3.864,1.035
3D body "SCRW_CHSH_PHLIPS_M3X5.stp": height 2.53, standoff -4.8, extent -3,-3 3,3

## Screw M3x5 crescent [mm] "Hole 3.0mm"
height 10
pads (1):
  round 3.225 hole 3.2 mask+0.1: 1(0,0)
via 1.838,1.838 diameter 1.1 hole 0.6
via 1.838,-1.838 diameter 1.1 hole 0.6
via -1.838,-1.838 diameter 1.1 hole 0.6
via 2.6,0 diameter 1.1 hole 0.6
via 0,-2.6 diameter 1.1 hole 0.6
Top Layer:
  pour cut-out: 0,-4 -0.262,-4 -0.782,-3.932 -1.289,-3.796 -1.773,-3.595 -2.227,-3.333 -2.643,-3.014 -3.014,-2.643 -3.333,-2.227 -3.595,-1.773 -3.796,-1.289 -3.932,-0.782 -4,-0.262 -4,0 -4,0.262 -3.932,0.782 -3.796,1.289 -3.595,1.773 -3.333,2.227 -3.014,2.643 -2.643,3.014 -2.227,3.333 -1.773,3.595 -1.289,3.796 -0.782,3.932 -0.262,4 0,4 0.262,4 0.782,3.932 1.289,3.796 1.773,3.595 2.227,3.333 2.643,3.014 3.014,2.643 3.333,2.227 3.595,1.773 3.796,1.289 3.932,0.782 4,0.262 4,0 4,-0.262 3.932,-0.782 3.796,-1.289 3.595,-1.773 3.333,-2.227 3.014,-2.643 2.643,-3.014 2.227,-3.333 1.773,-3.595 1.289,-3.796 0.782,-3.932 0.262,-4
  region: 0,-3.6 -0.11,-3.603 -0.329,-3.595 -0.548,-3.572 -0.765,-3.535 -0.979,-3.484 -1.189,-3.419 -1.394,-3.341 -1.594,-3.249 -1.787,-3.145 -1.973,-3.028 -2.151,-2.899 -2.32,-2.759 -2.4,-2.683 -2.4,2.4 2.683,2.4 2.759,2.32 2.899,2.151 3.028,1.973 3.145,1.787 3.249,1.594 3.341,1.394 3.419,1.189 3.484,0.979 3.535,0.765 3.572,0.548 3.595,0.329 3.603,0.11 3.6,0 3.6,-0.118 3.585,-0.353 3.554,-0.587 3.508,-0.818 3.447,-1.046 3.371,-1.269 3.281,-1.487 3.177,-1.698 3.059,-1.902 2.928,-2.098 2.784,-2.285 2.629,-2.462 2.462,-2.629 2.285,-2.784 2.098,-2.928 1.902,-3.059 1.698,-3.177 1.487,-3.281 1.269,-3.371 1.046,-3.447 0.818,-3.508 0.587,-3.554 0.353,-3.585 0.118,-3.6
Bottom Layer:
  pour cut-out: 0,-4 -0.262,-4 -0.782,-3.932 -1.289,-3.796 -1.773,-3.595 -2.227,-3.333 -2.643,-3.014 -3.014,-2.643 -3.333,-2.227 -3.595,-1.773 -3.796,-1.289 -3.932,-0.782 -4,-0.262 -4,0 -4,0.262 -3.932,0.782 -3.796,1.289 -3.595,1.773 -3.333,2.227 -3.014,2.643 -2.643,3.014 -2.227,3.333 -1.773,3.595 -1.289,3.796 -0.782,3.932 -0.262,4 0,4 0.262,4 0.782,3.932 1.289,3.796 1.773,3.595 2.227,3.333 2.643,3.014 3.014,2.643 3.333,2.227 3.595,1.773 3.796,1.289 3.932,0.782 4,0.262 4,0 4,-0.262 3.932,-0.782 3.796,-1.289 3.595,-1.773 3.333,-2.227 3.014,-2.643 2.643,-3.014 2.227,-3.333 1.773,-3.595 1.289,-3.796 0.782,-3.932 0.262,-4
  region: 0,-3.6 -0.11,-3.603 -0.329,-3.595 -0.548,-3.572 -0.765,-3.535 -0.979,-3.484 -1.189,-3.419 -1.394,-3.341 -1.594,-3.249 -1.787,-3.145 -1.973,-3.028 -2.151,-2.899 -2.32,-2.759 -2.4,-2.683 -2.4,2.4 2.683,2.4 2.759,2.32 2.899,2.151 3.028,1.973 3.145,1.787 3.249,1.594 3.341,1.394 3.419,1.189 3.484,0.979 3.535,0.765 3.572,0.548 3.595,0.329 3.603,0.11 3.6,0 3.6,-0.118 3.585,-0.353 3.554,-0.587 3.508,-0.818 3.447,-1.046 3.371,-1.269 3.281,-1.487 3.177,-1.698 3.059,-1.902 2.928,-2.098 2.784,-2.285 2.629,-2.462 2.462,-2.629 2.285,-2.784 2.098,-2.928 1.902,-3.059 1.698,-3.177 1.487,-3.281 1.269,-3.371 1.046,-3.447 0.818,-3.508 0.587,-3.554 0.353,-3.585 0.118,-3.6
Top Overlay:
  lines w0.4: -2.4,-3.2 ccw(c0,0) 3.2,2.4
3D body "SCRW_CHSH_PHLIPS_M3X5.stp": height 2.53, standoff -4.8, extent -3,-3 3,3